# Altium schematic symbol library TPS7A5401QRGRRQ1.SchLib: 1 symbol
Pins are listed as number, name and electrical type; pins without a type are passive.

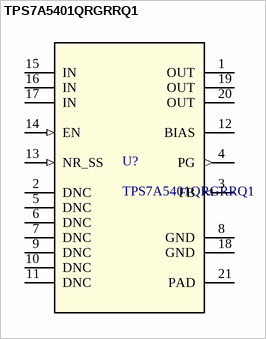
[diagram p0: symbol TPS7A5401QRGRRQ1]

## TPS7A5401QRGRRQ1
designator U?
Automotive 4-A, low-VIN (1.1-V), low-noise, high-accuracy, ultra-low-dropout (LDO) voltage regulator 20-VQFN -40 to 150; Manufacturer_Name: Texas Instruments; TYPE: TYPE; RefDes: RefDes; Copyright: Copyright (C) 2026 Ultra Librarian. All rights reserved.; Manufacturer_Part_Number: TPS7A5401QRGRRQ1
footprint RGR0020A
pins: 1 OUT (power), 2 DNC, 3 FB (in), 4 PG (out), 5 DNC, 6 DNC, 7 DNC, 8 GND (power), 9 DNC, 10 DNC, 11 DNC, 12 BIAS, 13 NR_SS (in), 14 EN (in), 15 IN (power), 16 IN (power), 17 IN (power), 18 GND (power), 19 OUT (power), 20 OUT (power), 21 PAD